# Altium schematic symbol library TitansLib.SchLib: 462 symbols (part 12 of 24)
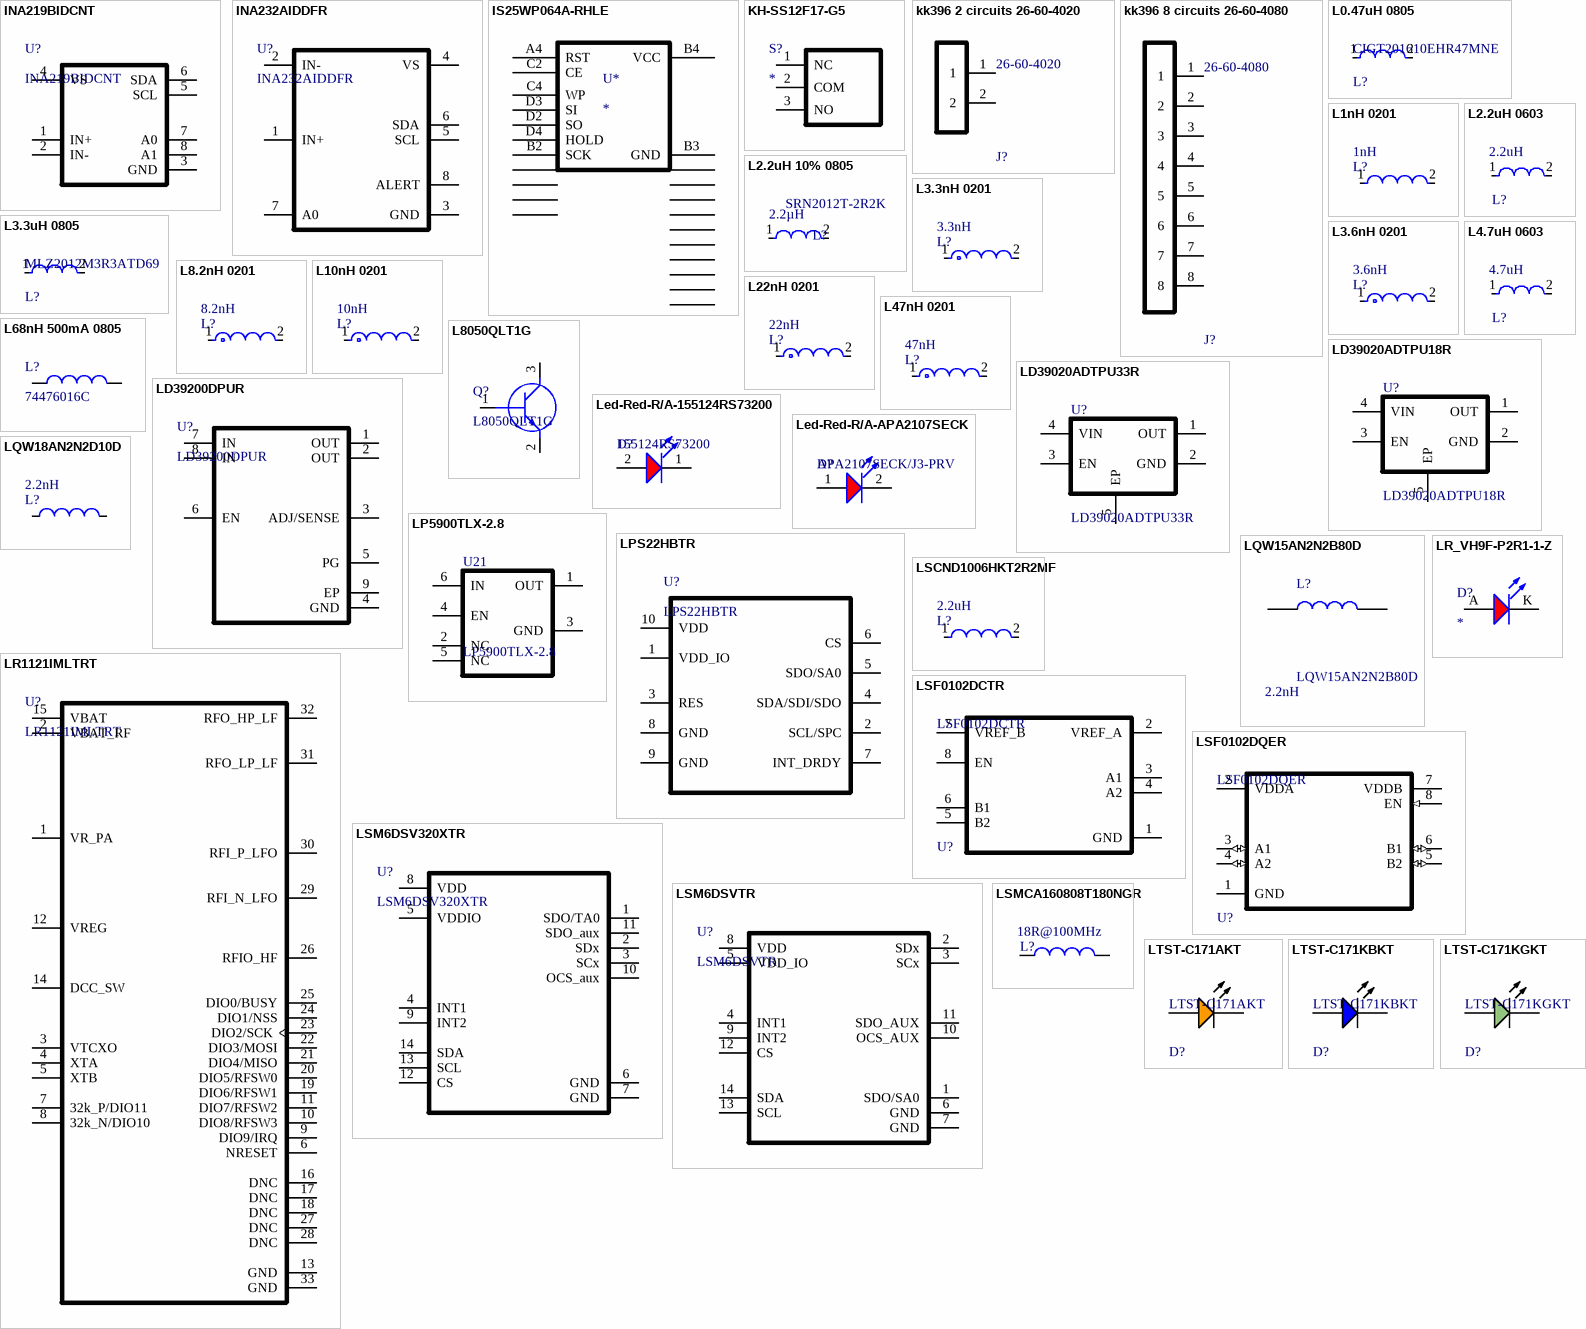
[diagram p28: symbols INA219BIDCNT to LTST-C171KGKT]

## LSF0102DQER
designator U?
Interface Circuit, PDSO8; Manufacturer: Texas Instruments; Max Supply Voltage: 5V; Number of Bits: 2; Channel Type: Bidirectional; Min Supply Voltage: 0uV; Propagation Delay: 1.3ns; Data Rate: 200Mbps; Low Level Output Current: 64mA; Logic Function: Translator; Turn-On Delay Time: 1.5ns; Number of Circuits: 1; Package Body Material: Plastic; Supply Voltage1-Max: 5.5V; Supply Voltage1-Min: 1.8V; Supply Voltage1-Nom: 3.3V; Radiation Hardening: No; Lead Free: Lead Free; Max Operating Temperature: 125°C; Mount: Surface Mount; Package Quantity: 5000; High Level Output Current: 64mA; RoHS Compliant: Yes; Packaging: Tape and Reel; Number of Pins: 8; Min Operating Temperature: -40°C; Supplier: Mouser; Supplier Part Number: 595-LSF0102DQER; Manufacturer Part Number: LSF0102DQER; RoHS: Yes; Category: Voltage Level Shifters; Stock: 65300; Pricing: 1=0.5, 10=0.352, 50=0.314, 100=0.273, 1000=0.231, 10000=0.202 (USD); Case/Package: VSON; Pins: 8; Package Shape: Rectangular; Terminal Finish: Nickel; JESD-609 Code: e4; Interface IC Type: INTERFACE CIRCUIT; JESD-30 Code: R-PDSO-N8; Moisture Sensitivity Level: 1; Channels: 1; Package Style: SMALL OUTLINE, VERY THIN PROFILEMeter; Peak Reflow Temperature (Cel): 260°C; Nominal Supply Voltage: 3.3V; Surface Mount: Yes; Terminal Form: No Lead; Terminal Position: DUAL; Length: 1.4mm; Width: 1mm; Height - Seated (Max): 0.4mm; Terminal Pitch: 0.35mm; Temperature Grade: AUTOMOTIVE; Reach SVHC Compliant: Yes; ComponentLink1URL: https://www.ti.com:443/lit/ds/symlink/lsf0101.pdf?src-supplier=IHS+Markit; ComponentLink1Description: https://www.ti.com:443/lit/ds/symlink/lsf0101.pdf?src-supplier=IHS+Markit; ComponentLink2URL: http://www.ti.com/lit/ds/symlink/lsf0102.pdf?src-supplier=Digikey; ComponentLink2Description: http://www.ti.com/lit/ds/symlink/lsf0102.pdf?src-supplier=Digikey; ComponentLink3URL: http://www.ti.com/lit/ds/symlink/lsf0102.pdf?src-supplier=Avnet; ComponentLink3Description: http://www.ti.com/lit/ds/symlink/lsf0102.pdf?src-supplier=Avnet; ComponentLink4URL: http://www.ti.com/lit/ds/symlink/lsf0102.pdf?src-supplier=Mouser; ComponentLink4Description: http://www.ti.com/lit/ds/symlink/lsf0102.pdf?src-supplier=Mouser; ComponentLink5URL: http://www.ti.com/lit/ds/symlink/lsf0102.pdf?src-supplier=Arrow+Electronics; ComponentLink5Description: http://www.ti.com/lit/ds/symlink/lsf0102.pdf?src-supplier=Arrow+Electronics; ComponentLink6URL: http://www.ti.com/lit/ds/symlink/lsf0102.pdf?src-supplier=Verical; ComponentLink6Description: http://www.ti.com/lit/ds/symlink/lsf0102.pdf?src-supplier=Verical; ComponentLink7URL: http://www.ti.com/lit/ds/symlink/lsf0102.pdf?src-supplier=Rochester+Electronics; ComponentLink7Description: http://www.ti.com/lit/ds/symlink/lsf0102.pdf?src-supplier=Rochester+Electronics
footprint DQE0008A-MFG
pins: 1 GND (power), 2 VDDA (power), 3 A1 (io), 4 A2 (io), 5 B2 (io), 6 B1 (io), 7 VDDB (power), 8 EN (in)

## LSM6DSV320XTR
designator U?
LSM6 Series 6-Axis ±320 g ±4000 dps 0.67 mA SPI/I²C IMU Sensor - LGA-14; Manufacturer: STMicroelectronics; Supplier: DigiKey; Supplier Part Number: 497-LSM6DSV320XTRDKR-ND; Manufacturer Part Number: LSM6DSV320XTR; RoHS: Compliant; Category: Sensors; Pricing: 1=6.74, 5=6.074, 10=5.826, 25=5.5296, 50=5.327, 100=5.1414, 500=4.9266 (USD); China RoHS: Non-Compliant; Lifecycle Status: Production; REACH SVHC: Yes; Supplier 1: Mouser; Supplier Part Number 1: 511-LSM6DSV320XTR; Supplier 2: DigiKey; Supplier Part Number 2: 497-LSM6DSV320XTRCT-ND; Supplier 3: DigiKey; Supplier Part Number 3: 497-LSM6DSV320XTR-ND
footprint LSM6DSV320XTR
pins: 1 SDO/TA0, 2 SDx, 3 SCx, 4 INT1, 5 VDDIO, 6 GND, 7 GND, 8 VDD, 9 INT2, 10 OCS_aux, 11 SDO_aux, 12 CS, 13 SCL, 14 SDA

## LSM6DSVTR
designator U?
3D Accelerometer And 3D Gyroscope; Manufacturer: STMicroelectronics; Supplier: Mouser; Supplier Part Number: 511-LSM6DSVTR; Manufacturer Part Number: LSM6DSVTR; RoHS: No; Category: Uncategorized; Stock: 5819; Pricing: 1=3.74, 10=3.21, 50=2.91, 100=2.8, 1000=2.51, 10000=2.34 (USD); Supplier 1: Digikey; Supplier Part Number 1: 497-LSM6DSVTRCT-ND; Supplier 2: Mouser; Supplier Part Number 2: 511-LSM6DSVTR
footprint LGA14-L_2P59X3P1X0P5_STM-L
pins: 1 SDO/SA0, 2 SDx, 3 SCx, 4 INT1, 5 VDD_IO, 6 GND, 7 GND, 8 VDD, 9 INT2, 10 OCS_AUX, 11 SDO_AUX, 12 CS, 13 SCL, 14 SDA

## LSMCA160808T180NGR
designator L?  Impedance: 18R@100MHz  (hidden comment: LSMCA160808T180NGR)
Ferrite Bead 18Ohm 7.5A 4Milliohms Wirewound 2-Pin 0603 Paper T/R; Manufacturer: TAIYO YUDEN; DC Resistance (DCR): 4mΩ; Number of Circuits: 1; ComponentLink1URL: http://tunmcdsvn.tun.st.com/Component_Documentation_Library/Trunk/Inductor/TAIYO_YUDEN_LSMC_Series; Supplier: DigiKey; Supplier Part Number: 587-LSMCA160808T180NGRCT-ND; Manufacturer Part Number: LSMCA160808T180NGR; RoHS: Compliant; Category: Ferrite Beads and Chips; Stock: 9000; Pricing: 1=0.11, 10=0.077, 25=0.0672, 50=0.0602, 100=0.0539, 250=0.0464, 500=0.04122, 1000=0.03642 (USD); Current Rating: 7.5A; Height: 800µm; Length: 1.6mm; Lifecycle Status: Production; Max Operating Temperature: 125°C; Min Operating Temperature: -40°C; Number of Terminals: 2; REACH SVHC: Yes; Width: 800µm; ComponentLink2URL: https://datasheet.octopart.com:443/LSMCA160808T180NGR-Taiyo-Yuden-datasheet-181264466.pdf?src-supplier=IHS; ComponentLink2Description: https://datasheet.octopart.com:443/LSMCA160808T180NGR-Taiyo-Yuden-datasheet-181264466.pdf?src-supplier=IHS; ComponentLink3URL: https://datasheet.octopart.com:443/LSMCA160808T180NGR-Taiyo-Yuden-datasheet-166554002.pdf?src-supplier=Future+Electronics; ComponentLink3Description: https://datasheet.octopart.com:443/LSMCA160808T180NGR-Taiyo-Yuden-datasheet-166554002.pdf?src-supplier=Future+Electronics; ComponentLink4URL: https://datasheet.octopart.com:443/LSMCA160808T180NGR-Taiyo-Yuden-datasheet-99833420.pdf?src-supplier=Future+Electronics; ComponentLink4Description: https://datasheet.octopart.com:443/LSMCA160808T180NGR-Taiyo-Yuden-datasheet-99833420.pdf?src-supplier=Future+Electronics
footprint IND_0603_LSMCA_H1P0
pins: 1, 2

## LTST-C171AKT
designator D?
LED ORANGE 0805 wavelength 602nm light intensity 35mcd Front Mounting; Manufacturer: Lite-On; Forward Current: 30mA; Forward Voltage: 2V; Lens Color: Clear, Colorless; Lens Style: Clear; Number of Circuits: 1; Power Dissipation: 75mW; Reverse Voltage: 5V; Shape: Rectangular; Test Current: 20mA; Viewing Angle: 130°; Wavelength: 570nm; Supplier: DigiKey; Supplier Part Number: 160-1419-1-ND; Manufacturer Part Number: LTST-C171AKT; RoHS: Compliant; Category: LEDs; Stock: 263738; Pricing: 1=0.11, 10=0.077, 100=0.0529, 500=0.04166, 1000=0.03789 (USD); Case/Package: 0805; Case Code (Imperial): 0805; Case Code (Metric): 2012; China RoHS: Compliant; Color: ORANGE; Depth: 1.25mm; Dominant Wavelength: 602nm; Height: 800µm; Illumination Color: ORANGE; Lead Free: Lead Free; Length: 2mm; Lens Transparency: Clear; Lifecycle Status: Production; Luminous Intensity: 35mcd; Max Operating Temperature: 85°C; Min Operating Temperature: -55°C; Mounting Technology: Surface Mount; Number of Elements: 1; Number of LEDs: 1; Pins: 2; Number of Terminals: 2; Peak Wavelength: 602nm; Power Rating: 75mW; Radiation Hardening: No; REACH SVHC: Yes; Schedule B: 8541402000, 8541402000|8541402000|8541402000|8541402000|8541402000; Terminal Pitch: 2.5mm; Width: 1.25mm; ComponentLink1URL: https://datasheet.octopart.com:443/LTST-C171KGKT-Lite-On-datasheet-62340967.pdf?src-supplier=ODG+(Origin+Data+Global); ComponentLink1Description: https://datasheet.octopart.com:443/LTST-C171KGKT-Lite-On-datasheet-62340967.pdf?src-supplier=ODG+(Origin+Data+Global); ComponentLink2URL: https://datasheet.octopart.com:443/LTST-C171KGKT-Lite-On-datasheet-180605161.pdf?src-supplier=IHS; ComponentLink2Description: https://datasheet.octopart.com:443/LTST-C171KGKT-Lite-On-datasheet-180605161.pdf?src-supplier=IHS; ComponentLink3URL: https://datasheet.octopart.com:443/LTST-C171KGKT-Lite-On-datasheet-159335.pdf?src-supplier=_legacy+Avnet; ComponentLink3Description: https://datasheet.octopart.com:443/LTST-C171KGKT-Lite-On-datasheet-159335.pdf?src-supplier=_legacy+Avnet; ComponentLink4URL: https://datasheet.octopart.com:443/LTST-C171KGKT-Lite-On-datasheet-166322636.pdf?src-supplier=TME; ComponentLink4Description: https://datasheet.octopart.com:443/LTST-C171KGKT-Lite-On-datasheet-166322636.pdf?src-supplier=TME; ComponentLink5URL: https://datasheet.octopart.com:443/LTST-C171KGKT-Lite-On-datasheet-165573808.pdf?src-supplier=TME; ComponentLink5Description: https://datasheet.octopart.com:443/LTST-C171KGKT-Lite-On-datasheet-165573808.pdf?src-supplier=TME; ComponentLink6URL: https://datasheet.octopart.com:443/LTST-C171KGKT-Lite-On-datasheet-137080783.pdf?src-supplier=X-ON; ComponentLink6Description: https://datasheet.octopart.com:443/LTST-C171KGKT-Lite-On-datasheet-137080783.pdf?src-supplier=X-ON; ComponentLink7URL: https://datasheet.octopart.com:443/LTST-C171KGKT-Lite-On-datasheet-8328465.pdf?src-supplier=Future+Electronics; ComponentLink7Description: https://datasheet.octopart.com:443/LTST-C171KGKT-Lite-On-datasheet-8328465.pdf?src-supplier=Future+Electronics; ComponentLink8URL: https://datasheet.octopart.com:443/LTST-C171KGKT-Lite-On-datasheet-19967.pdf?src-supplier=DigiKey; ComponentLink8Description: https://datasheet.octopart.com:443/LTST-C171KGKT-Lite-On-datasheet-19967.pdf?src-supplier=DigiKey; ComponentLink9URL: https://datasheet.octopart.com:443/LTST-C171KGKT-Lite-On-datasheet-14175002.pdf?src-supplier=iiiC; ComponentLink9Description: https://datasheet.octopart.com:443/LTST-C171KGKT-Lite-On-datasheet-14175002.pdf?src-supplier=iiiC; Supplier 1: DigiKey; Supplier Part Number 1: 160-1426-1-ND; Supplier 2: DigiKey; Supplier Part Number 2: 160-1426-2-ND; Supplier 3: Mouser; Supplier Part Number 3: 859-LTST-C171KGKT
footprint LTST-C171KXKT
pins: 1 A, 2 K

## LTST-C171KBKT
designator D?
LED BLUE 0805 wavelength 470nm light intensity 35mcd Front Mounting; Manufacturer: Lite-On; Color: RED; Dominant Wavelength: 468nm; Forward Current: 30mA; Forward Voltage: 2V; Lens Color: Clear, Colorless; Lens Style: Clear; Number of Circuits: 1; Power Dissipation: 75mW; Reverse Voltage: 5V; Shape: Rectangular; Test Current: 20mA; Viewing Angle: 130°; Wavelength: 570nm; Supplier: DigiKey; Supplier Part Number: 160-1645-1-ND; Manufacturer Part Number: LTST-C171KBKT; RoHS: Compliant; Category: LEDs; Stock: 263738; Pricing: 1=0.11, 10=0.077, 100=0.0529, 500=0.04166, 1000=0.03789 (USD); Case/Package: 0805; Case Code (Imperial): 0805; Case Code (Metric): 2012; China RoHS: Compliant; Depth: 1.25mm; Height: 800µm; Illumination Color: BLUE; Lead Free: Lead Free; Length: 2mm; Lens Transparency: Clear; Lifecycle Status: Production; Luminous Intensity: 35mcd; Max Operating Temperature: 85°C; Min Operating Temperature: -55°C; Mounting Technology: Surface Mount; Number of Elements: 1; Number of LEDs: 1; Pins: 2; Number of Terminals: 2; Peak Wavelength: 468nm; Power Rating: 75mW; Radiation Hardening: No; REACH SVHC: Yes; Schedule B: 8541402000, 8541402000|8541402000|8541402000|8541402000|8541402000; Terminal Pitch: 2.5mm; Width: 1.25mm; ComponentLink1URL: https://datasheet.octopart.com:443/LTST-C171KGKT-Lite-On-datasheet-62340967.pdf?src-supplier=ODG+(Origin+Data+Global); ComponentLink1Description: https://datasheet.octopart.com:443/LTST-C171KGKT-Lite-On-datasheet-62340967.pdf?src-supplier=ODG+(Origin+Data+Global); ComponentLink2URL: https://datasheet.octopart.com:443/LTST-C171KGKT-Lite-On-datasheet-180605161.pdf?src-supplier=IHS; ComponentLink2Description: https://datasheet.octopart.com:443/LTST-C171KGKT-Lite-On-datasheet-180605161.pdf?src-supplier=IHS; ComponentLink3URL: https://datasheet.octopart.com:443/LTST-C171KGKT-Lite-On-datasheet-159335.pdf?src-supplier=_legacy+Avnet; ComponentLink3Description: https://datasheet.octopart.com:443/LTST-C171KGKT-Lite-On-datasheet-159335.pdf?src-supplier=_legacy+Avnet; ComponentLink4URL: https://datasheet.octopart.com:443/LTST-C171KGKT-Lite-On-datasheet-166322636.pdf?src-supplier=TME; ComponentLink4Description: https://datasheet.octopart.com:443/LTST-C171KGKT-Lite-On-datasheet-166322636.pdf?src-supplier=TME; ComponentLink5URL: https://datasheet.octopart.com:443/LTST-C171KGKT-Lite-On-datasheet-165573808.pdf?src-supplier=TME; ComponentLink5Description: https://datasheet.octopart.com:443/LTST-C171KGKT-Lite-On-datasheet-165573808.pdf?src-supplier=TME; ComponentLink6URL: https://datasheet.octopart.com:443/LTST-C171KGKT-Lite-On-datasheet-137080783.pdf?src-supplier=X-ON; ComponentLink6Description: https://datasheet.octopart.com:443/LTST-C171KGKT-Lite-On-datasheet-137080783.pdf?src-supplier=X-ON; ComponentLink7URL: https://datasheet.octopart.com:443/LTST-C171KGKT-Lite-On-datasheet-8328465.pdf?src-supplier=Future+Electronics; ComponentLink7Description: https://datasheet.octopart.com:443/LTST-C171KGKT-Lite-On-datasheet-8328465.pdf?src-supplier=Future+Electronics; ComponentLink8URL: https://datasheet.octopart.com:443/LTST-C171KGKT-Lite-On-datasheet-19967.pdf?src-supplier=DigiKey; ComponentLink8Description: https://datasheet.octopart.com:443/LTST-C171KGKT-Lite-On-datasheet-19967.pdf?src-supplier=DigiKey; ComponentLink9URL: https://datasheet.octopart.com:443/LTST-C171KGKT-Lite-On-datasheet-14175002.pdf?src-supplier=iiiC; ComponentLink9Description: https://datasheet.octopart.com:443/LTST-C171KGKT-Lite-On-datasheet-14175002.pdf?src-supplier=iiiC; Supplier 1: DigiKey; Supplier Part Number 1: 160-1426-1-ND; Supplier 2: DigiKey; Supplier Part Number 2: 160-1426-2-ND; Supplier 3: Mouser; Supplier Part Number 3: 859-LTST-C171KGKT
footprint LTST-C171KXKT
pins: 1 A, 2 K

## LTST-C171KGKT
designator D?
LED yellow green 0805 wavelength 571nm light intensity 35mcd Front Mounting; Manufacturer: Lite-On; Forward Current: 30mA; Forward Voltage: 2V; Lens Color: Clear, Colorless; Lens Style: Clear; Number of Circuits: 1; Peak Wavelength: 574nm; Power Dissipation: 75mW; Reverse Voltage: 5V; Shape: Rectangular; Test Current: 20mA; Viewing Angle: 130°; Wavelength: 570nm; Supplier: DigiKey; Supplier Part Number: 160-1426-1-ND; Manufacturer Part Number: LTST-C171KGKT; RoHS: Compliant; Category: LEDs; Stock: 263738; Pricing: 1=0.11, 10=0.077, 100=0.0529, 500=0.04166, 1000=0.03789 (USD); Case/Package: 0805; Case Code (Imperial): 0805; Case Code (Metric): 2012; China RoHS: Compliant; Color: Green; Depth: 1.25mm; Dominant Wavelength: 571nm; Height: 800µm; Illumination Color: Green; Lead Free: Lead Free; Length: 2mm; Lens Transparency: Clear; Lifecycle Status: Production; Luminous Intensity: 35mcd; Max Operating Temperature: 85°C; Min Operating Temperature: -55°C; Mounting Technology: Surface Mount; Number of Elements: 1; Number of LEDs: 1; Pins: 2; Number of Terminals: 2; Power Rating: 75mW; Radiation Hardening: No; REACH SVHC: Yes; Schedule B: 8541402000, 8541402000|8541402000|8541402000|8541402000|8541402000; Terminal Pitch: 2.5mm; Width: 1.25mm; ComponentLink1URL: https://datasheet.octopart.com:443/LTST-C171KGKT-Lite-On-datasheet-62340967.pdf?src-supplier=ODG+(Origin+Data+Global); ComponentLink1Description: https://datasheet.octopart.com:443/LTST-C171KGKT-Lite-On-datasheet-62340967.pdf?src-supplier=ODG+(Origin+Data+Global); ComponentLink2URL: https://datasheet.octopart.com:443/LTST-C171KGKT-Lite-On-datasheet-180605161.pdf?src-supplier=IHS; ComponentLink2Description: https://datasheet.octopart.com:443/LTST-C171KGKT-Lite-On-datasheet-180605161.pdf?src-supplier=IHS; ComponentLink3URL: https://datasheet.octopart.com:443/LTST-C171KGKT-Lite-On-datasheet-159335.pdf?src-supplier=_legacy+Avnet; ComponentLink3Description: https://datasheet.octopart.com:443/LTST-C171KGKT-Lite-On-datasheet-159335.pdf?src-supplier=_legacy+Avnet; ComponentLink4URL: https://datasheet.octopart.com:443/LTST-C171KGKT-Lite-On-datasheet-166322636.pdf?src-supplier=TME; ComponentLink4Description: https://datasheet.octopart.com:443/LTST-C171KGKT-Lite-On-datasheet-166322636.pdf?src-supplier=TME; ComponentLink5URL: https://datasheet.octopart.com:443/LTST-C171KGKT-Lite-On-datasheet-165573808.pdf?src-supplier=TME; ComponentLink5Description: https://datasheet.octopart.com:443/LTST-C171KGKT-Lite-On-datasheet-165573808.pdf?src-supplier=TME; ComponentLink6URL: https://datasheet.octopart.com:443/LTST-C171KGKT-Lite-On-datasheet-137080783.pdf?src-supplier=X-ON; ComponentLink6Description: https://datasheet.octopart.com:443/LTST-C171KGKT-Lite-On-datasheet-137080783.pdf?src-supplier=X-ON; ComponentLink7URL: https://datasheet.octopart.com:443/LTST-C171KGKT-Lite-On-datasheet-8328465.pdf?src-supplier=Future+Electronics; ComponentLink7Description: https://datasheet.octopart.com:443/LTST-C171KGKT-Lite-On-datasheet-8328465.pdf?src-supplier=Future+Electronics; ComponentLink8URL: https://datasheet.octopart.com:443/LTST-C171KGKT-Lite-On-datasheet-19967.pdf?src-supplier=DigiKey; ComponentLink8Description: https://datasheet.octopart.com:443/LTST-C171KGKT-Lite-On-datasheet-19967.pdf?src-supplier=DigiKey; ComponentLink9URL: https://datasheet.octopart.com:443/LTST-C171KGKT-Lite-On-datasheet-14175002.pdf?src-supplier=iiiC; ComponentLink9Description: https://datasheet.octopart.com:443/LTST-C171KGKT-Lite-On-datasheet-14175002.pdf?src-supplier=iiiC; Supplier 1: DigiKey; Supplier Part Number 1: 160-1426-1-ND; Supplier 2: DigiKey; Supplier Part Number 2: 160-1426-2-ND; Supplier 3: Mouser; Supplier Part Number 3: 859-LTST-C171KGKT
footprint LTST-C171KGKT
pins: 1 A, 2 K

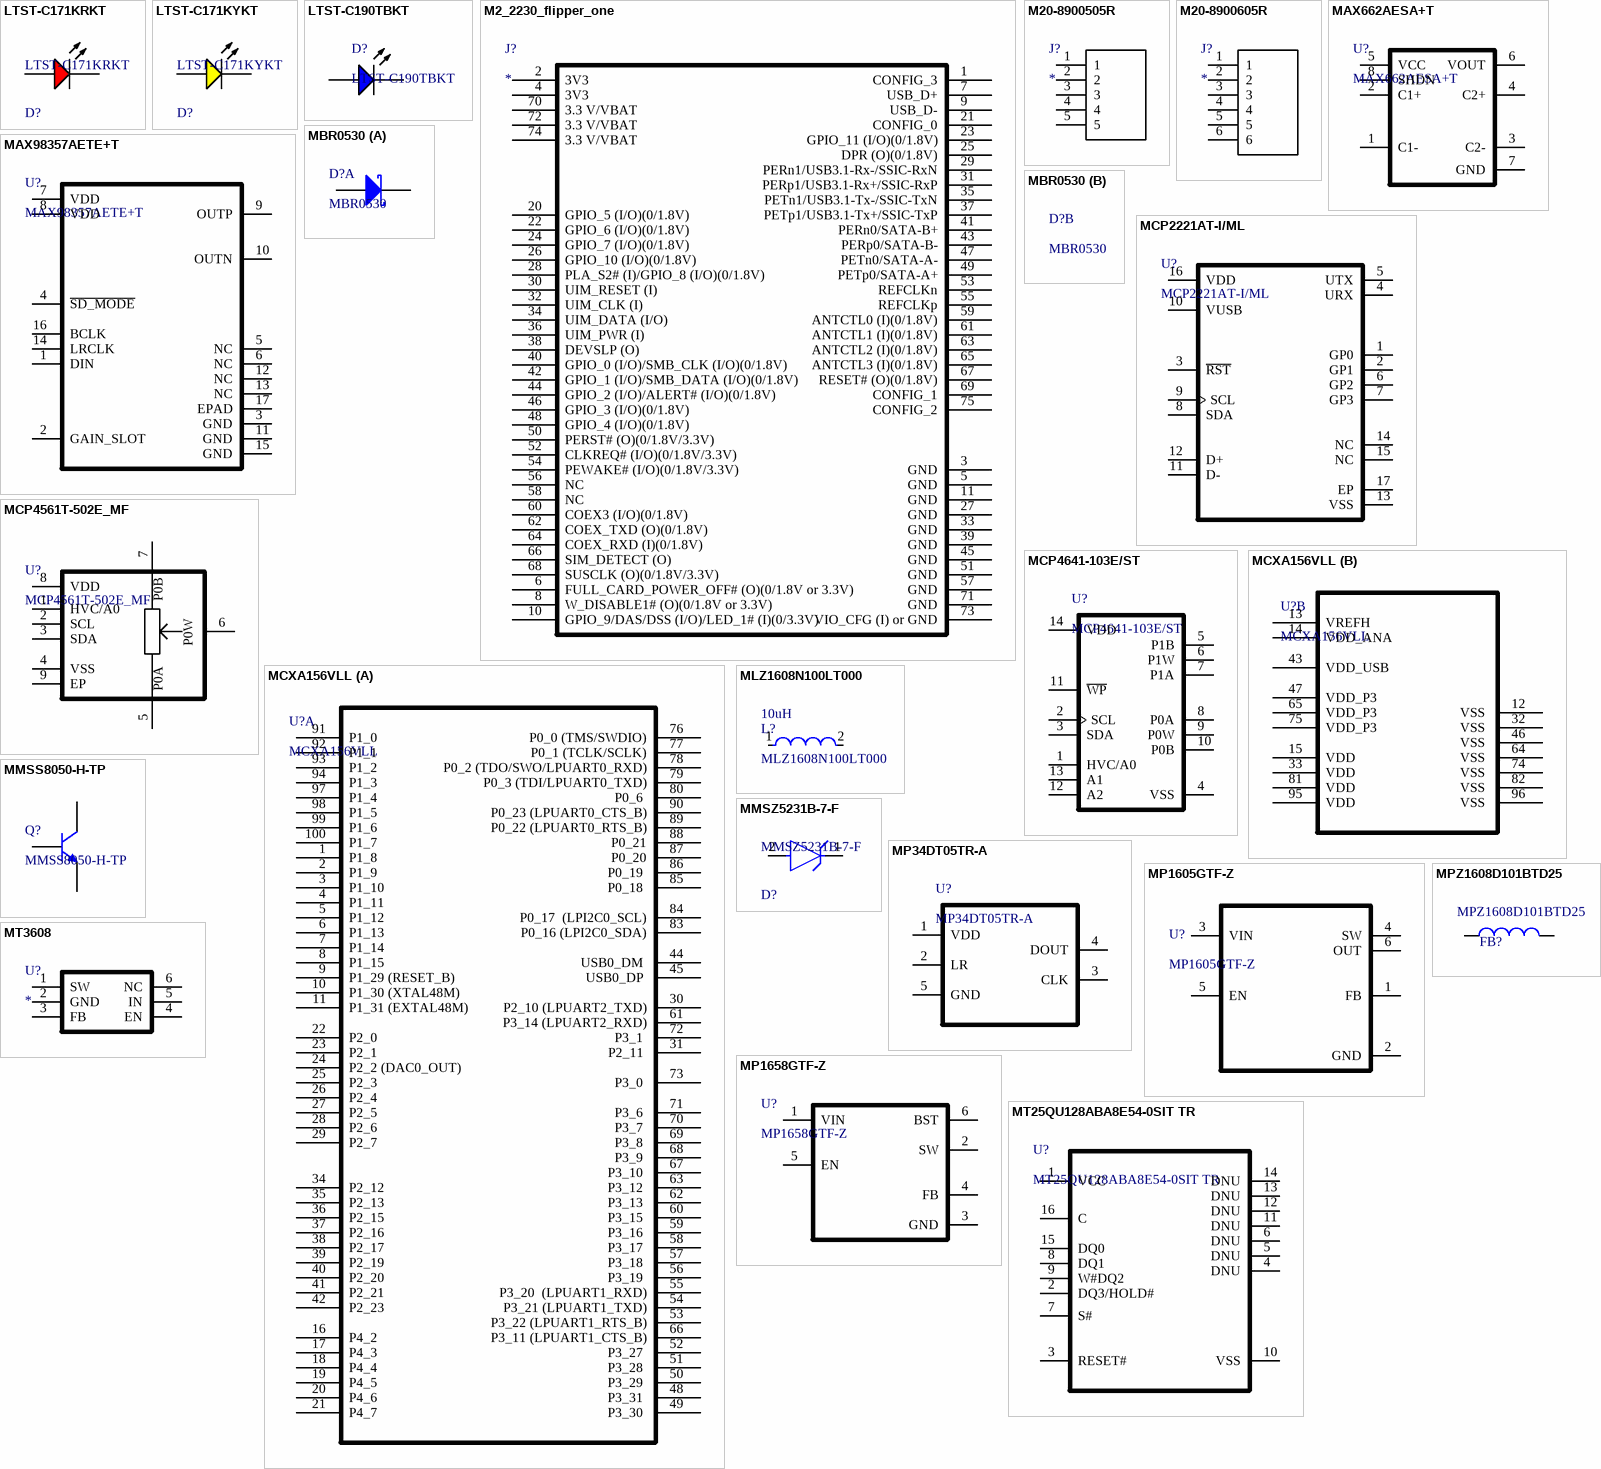
[diagram p7: symbols LTST-C171KRKT to MT3608]

## LTST-C171KRKT
designator D?
LED RED 0805 wavelength 639nm light intensity 35mcd Front Mounting; Manufacturer: Lite-On; Forward Current: 30mA; Forward Voltage: 2V; Lens Color: Clear, Colorless; Lens Style: Clear; Number of Circuits: 1; Power Dissipation: 75mW; Reverse Voltage: 5V; Shape: Rectangular; Test Current: 20mA; Viewing Angle: 130°; Wavelength: 570nm; Supplier: DigiKey; Supplier Part Number: 160-1427-1-ND; Manufacturer Part Number: LTST-C171KRKT; RoHS: Compliant; Category: LEDs; Stock: 263738; Pricing: 1=0.11, 10=0.077, 100=0.0529, 500=0.04166, 1000=0.03789 (USD); Case/Package: 0805; Case Code (Imperial): 0805; Case Code (Metric): 2012; China RoHS: Compliant; Color: RED; Depth: 1.25mm; Dominant Wavelength: 639nm; Height: 800µm; Illumination Color: RED; Lead Free: Lead Free; Length: 2mm; Lens Transparency: Clear; Lifecycle Status: Production; Luminous Intensity: 35mcd; Max Operating Temperature: 85°C; Min Operating Temperature: -55°C; Mounting Technology: Surface Mount; Number of Elements: 1; Number of LEDs: 1; Pins: 2; Number of Terminals: 2; Peak Wavelength: 639nm; Power Rating: 75mW; Radiation Hardening: No; REACH SVHC: Yes; Schedule B: 8541402000, 8541402000|8541402000|8541402000|8541402000|8541402000; Terminal Pitch: 2.5mm; Width: 1.25mm; ComponentLink1URL: https://datasheet.octopart.com:443/LTST-C171KGKT-Lite-On-datasheet-62340967.pdf?src-supplier=ODG+(Origin+Data+Global); ComponentLink1Description: https://datasheet.octopart.com:443/LTST-C171KGKT-Lite-On-datasheet-62340967.pdf?src-supplier=ODG+(Origin+Data+Global); ComponentLink2URL: https://datasheet.octopart.com:443/LTST-C171KGKT-Lite-On-datasheet-180605161.pdf?src-supplier=IHS; ComponentLink2Description: https://datasheet.octopart.com:443/LTST-C171KGKT-Lite-On-datasheet-180605161.pdf?src-supplier=IHS; ComponentLink3URL: https://datasheet.octopart.com:443/LTST-C171KGKT-Lite-On-datasheet-159335.pdf?src-supplier=_legacy+Avnet; ComponentLink3Description: https://datasheet.octopart.com:443/LTST-C171KGKT-Lite-On-datasheet-159335.pdf?src-supplier=_legacy+Avnet; ComponentLink4URL: https://datasheet.octopart.com:443/LTST-C171KGKT-Lite-On-datasheet-166322636.pdf?src-supplier=TME; ComponentLink4Description: https://datasheet.octopart.com:443/LTST-C171KGKT-Lite-On-datasheet-166322636.pdf?src-supplier=TME; ComponentLink5URL: https://datasheet.octopart.com:443/LTST-C171KGKT-Lite-On-datasheet-165573808.pdf?src-supplier=TME; ComponentLink5Description: https://datasheet.octopart.com:443/LTST-C171KGKT-Lite-On-datasheet-165573808.pdf?src-supplier=TME; ComponentLink6URL: https://datasheet.octopart.com:443/LTST-C171KGKT-Lite-On-datasheet-137080783.pdf?src-supplier=X-ON; ComponentLink6Description: https://datasheet.octopart.com:443/LTST-C171KGKT-Lite-On-datasheet-137080783.pdf?src-supplier=X-ON; ComponentLink7URL: https://datasheet.octopart.com:443/LTST-C171KGKT-Lite-On-datasheet-8328465.pdf?src-supplier=Future+Electronics; ComponentLink7Description: https://datasheet.octopart.com:443/LTST-C171KGKT-Lite-On-datasheet-8328465.pdf?src-supplier=Future+Electronics; ComponentLink8URL: https://datasheet.octopart.com:443/LTST-C171KGKT-Lite-On-datasheet-19967.pdf?src-supplier=DigiKey; ComponentLink8Description: https://datasheet.octopart.com:443/LTST-C171KGKT-Lite-On-datasheet-19967.pdf?src-supplier=DigiKey; ComponentLink9URL: https://datasheet.octopart.com:443/LTST-C171KGKT-Lite-On-datasheet-14175002.pdf?src-supplier=iiiC; ComponentLink9Description: https://datasheet.octopart.com:443/LTST-C171KGKT-Lite-On-datasheet-14175002.pdf?src-supplier=iiiC; Supplier 1: DigiKey; Supplier Part Number 1: 160-1426-1-ND; Supplier 2: DigiKey; Supplier Part Number 2: 160-1426-2-ND; Supplier 3: Mouser; Supplier Part Number 3: 859-LTST-C171KGKT
footprint LTST-C171KXKT
pins: 1 A, 2 K

## LTST-C171KYKT
designator D?
LED YELLOW 0805 wavelength 585nm light intensity 35mcd Front Mounting; Manufacturer: Lite-On; Forward Current: 30mA; Forward Voltage: 2V; Lens Color: Clear, Colorless; Lens Style: Clear; Number of Circuits: 1; Power Dissipation: 75mW; Reverse Voltage: 5V; Shape: Rectangular; Test Current: 20mA; Viewing Angle: 130°; Wavelength: 570nm; Supplier: DigiKey; Supplier Part Number: 160-1431-1-ND; Manufacturer Part Number: LTST-C171KYKT; RoHS: Compliant; Category: LEDs; Stock: 263738; Pricing: 1=0.11, 10=0.077, 100=0.0529, 500=0.04166, 1000=0.03789 (USD); Case/Package: 0805; Case Code (Imperial): 0805; Case Code (Metric): 2012; China RoHS: Compliant; Color: YELLOW; Depth: 1.25mm; Dominant Wavelength: 585nm; Height: 800µm; Illumination Color: YELLOW; Lead Free: Lead Free; Length: 2mm; Lens Transparency: Clear; Lifecycle Status: Production; Luminous Intensity: 35mcd; Max Operating Temperature: 85°C; Min Operating Temperature: -55°C; Mounting Technology: Surface Mount; Number of Elements: 1; Number of LEDs: 1; Pins: 2; Number of Terminals: 2; Peak Wavelength: 585nm; Power Rating: 75mW; Radiation Hardening: No; REACH SVHC: Yes; Schedule B: 8541402000, 8541402000|8541402000|8541402000|8541402000|8541402000; Terminal Pitch: 2.5mm; Width: 1.25mm; ComponentLink1URL: https://datasheet.octopart.com:443/LTST-C171KGKT-Lite-On-datasheet-62340967.pdf?src-supplier=ODG+(Origin+Data+Global); ComponentLink1Description: https://datasheet.octopart.com:443/LTST-C171KGKT-Lite-On-datasheet-62340967.pdf?src-supplier=ODG+(Origin+Data+Global); ComponentLink2URL: https://datasheet.octopart.com:443/LTST-C171KGKT-Lite-On-datasheet-180605161.pdf?src-supplier=IHS; ComponentLink2Description: https://datasheet.octopart.com:443/LTST-C171KGKT-Lite-On-datasheet-180605161.pdf?src-supplier=IHS; ComponentLink3URL: https://datasheet.octopart.com:443/LTST-C171KGKT-Lite-On-datasheet-159335.pdf?src-supplier=_legacy+Avnet; ComponentLink3Description: https://datasheet.octopart.com:443/LTST-C171KGKT-Lite-On-datasheet-159335.pdf?src-supplier=_legacy+Avnet; ComponentLink4URL: https://datasheet.octopart.com:443/LTST-C171KGKT-Lite-On-datasheet-166322636.pdf?src-supplier=TME; ComponentLink4Description: https://datasheet.octopart.com:443/LTST-C171KGKT-Lite-On-datasheet-166322636.pdf?src-supplier=TME; ComponentLink5URL: https://datasheet.octopart.com:443/LTST-C171KGKT-Lite-On-datasheet-165573808.pdf?src-supplier=TME; ComponentLink5Description: https://datasheet.octopart.com:443/LTST-C171KGKT-Lite-On-datasheet-165573808.pdf?src-supplier=TME; ComponentLink6URL: https://datasheet.octopart.com:443/LTST-C171KGKT-Lite-On-datasheet-137080783.pdf?src-supplier=X-ON; ComponentLink6Description: https://datasheet.octopart.com:443/LTST-C171KGKT-Lite-On-datasheet-137080783.pdf?src-supplier=X-ON; ComponentLink7URL: https://datasheet.octopart.com:443/LTST-C171KGKT-Lite-On-datasheet-8328465.pdf?src-supplier=Future+Electronics; ComponentLink7Description: https://datasheet.octopart.com:443/LTST-C171KGKT-Lite-On-datasheet-8328465.pdf?src-supplier=Future+Electronics; ComponentLink8URL: https://datasheet.octopart.com:443/LTST-C171KGKT-Lite-On-datasheet-19967.pdf?src-supplier=DigiKey; ComponentLink8Description: https://datasheet.octopart.com:443/LTST-C171KGKT-Lite-On-datasheet-19967.pdf?src-supplier=DigiKey; ComponentLink9URL: https://datasheet.octopart.com:443/LTST-C171KGKT-Lite-On-datasheet-14175002.pdf?src-supplier=iiiC; ComponentLink9Description: https://datasheet.octopart.com:443/LTST-C171KGKT-Lite-On-datasheet-14175002.pdf?src-supplier=iiiC; Supplier 1: DigiKey; Supplier Part Number 1: 160-1426-1-ND; Supplier 2: DigiKey; Supplier Part Number 2: 160-1426-2-ND; Supplier 3: Mouser; Supplier Part Number 3: 859-LTST-C171KGKT
footprint LTST-C171KXKT
pins: 1 A, 2 K

## LTST-C190TBKT
designator D?
LED blue 0603 wavelength 465~475nm light intensity 28~180mcd Front Mounting; Manufacturer: Lite-On; Current: 2A; Dominant Wavelength: 475nm; Forward Current: 20mA; Forward Voltage: 3.8V; Interface: Serial; Lens Color: Clear, Colorless; Lens Style: Clear; Luminous Intensity: 70mcd; Max Supply Voltage: 3.6V; Min Supply Voltage: 2.1V; Nominal Supply Voltage (DC): 3V; Number of Circuits: 1; Peak Wavelength: 468nm; Power Dissipation: 76mW; Reverse Voltage: 5V; Shape: Rectangular; Viewing Angle: 130°; Supplier: DigiKey; Supplier Part Number: 160-1646-1-ND; Manufacturer Part Number: LTST-C190TBKT; RoHS: Compliant; Category: LEDs; Stock: 286026; Pricing: 1=0.14, 10=0.094, 100=0.0645, 500=0.051, 1000=0.04651, 2000=0.04266 (USD); Case/Package: 0603; Case Code (Imperial): 0603; Case Code (Metric): 1608; China RoHS: Compliant; Color: Blue; Contact Plating: Tin; Country of Origin: Thailand; Depth: 800µm; Export Control Classification Number (ECCN) Code: EAR99; Height: 800µm; Harmonized Tariff Schedule (HTS) Code: 8541.40.20.00; Illumination Color: Blue; Introduction Date: 2001-01-31; Lead Free: Lead Free; Length: 3mm; Lens Transparency: Clear; Lifecycle Status: Production; Max Operating Temperature: 80°C; Min Operating Temperature: -20°C; Mounting Technology: Surface Mount; Number of Elements: 1; Number of LEDs: 1; Pins: 2; Number of Terminals: 2; Packaging: Cut Tape; Radiation Hardening: No; REACH SVHC: Yes; Schedule B: 8541402000, 8541402000|8541402000|8541402000|8541402000|8541402000; Terminal Pitch: 1.5mm; Test Current: 20mA; Wavelength: 475nm; Width: 3mm; ComponentLink1URL: https://datasheet.octopart.com:443/LTST-C190TBKT-Lite-On-datasheet-26684744.pdf?src-supplier=Upverter; ComponentLink1Description: https://datasheet.octopart.com:443/LTST-C190TBKT-Lite-On-datasheet-26684744.pdf?src-supplier=Upverter; ComponentLink2URL: https://datasheet.octopart.com:443/LTST-C190TBKT-Lite-On-datasheet-158557.pdf?src-supplier=Upverter; ComponentLink2Description: https://datasheet.octopart.com:443/LTST-C190TBKT-Lite-On-datasheet-158557.pdf?src-supplier=Upverter; ComponentLink3URL: https://datasheet.octopart.com:443/LTST-C190TBKT-Lite-On-datasheet-157246185.pdf?src-supplier=ODG+(Origin+Data+Global); ComponentLink3Description: https://datasheet.octopart.com:443/LTST-C190TBKT-Lite-On-datasheet-157246185.pdf?src-supplier=ODG+(Origin+Data+Global); ComponentLink4URL: https://datasheet.octopart.com:443/LTST-C190TBKT-Lite-On-datasheet-165573809.pdf?src-supplier=TME; ComponentLink4Description: https://datasheet.octopart.com:443/LTST-C190TBKT-Lite-On-datasheet-165573809.pdf?src-supplier=TME; ComponentLink5URL: https://datasheet.octopart.com:443/LTST-C190TBKT-Lite-On-datasheet-165573808.pdf?src-supplier=TME; ComponentLink5Description: https://datasheet.octopart.com:443/LTST-C190TBKT-Lite-On-datasheet-165573808.pdf?src-supplier=TME; ComponentLink6URL: https://datasheet.octopart.com:443/LTST-C190TBKT-Lite-On-datasheet-13699638.pdf?src-supplier=_legacy+Avnet; ComponentLink6Description: https://datasheet.octopart.com:443/LTST-C190TBKT-Lite-On-datasheet-13699638.pdf?src-supplier=_legacy+Avnet; ComponentLink7URL: https://datasheet.octopart.com:443/LTST-C190TBKT-Lite-On-datasheet-10435795.pdf?src-supplier=Jameco; ComponentLink7Description: https://datasheet.octopart.com:443/LTST-C190TBKT-Lite-On-datasheet-10435795.pdf?src-supplier=Jameco; ComponentLink8URL: https://datasheet.octopart.com:443/LTST-C190TBKT-Lite-On-datasheet-86356.pdf?src-supplier=DigiKey; ComponentLink8Description: https://datasheet.octopart.com:443/LTST-C190TBKT-Lite-On-datasheet-86356.pdf?src-supplier=DigiKey; ComponentLink9URL: https://datasheet.octopart.com:443/LTST-C190TBKT-Lite-On-datasheet-14175004.pdf?src-supplier=iiiC; ComponentLink9Description: https://datasheet.octopart.com:443/LTST-C190TBKT-Lite-On-datasheet-14175004.pdf?src-supplier=iiiC; ComponentLink10URL: https://datasheet.octopart.com:443/LTST-C190TBKT-Lite-On-datasheet-86397318.pdf?src-supplier=Future+Electronics; ComponentLink10Description: https://datasheet.octopart.com:443/LTST-C190TBKT-Lite-On-datasheet-86397318.pdf?src-supplier=Future+Electronics; Supplier 1: DigiKey; Supplier Part Number 1: 160-1646-6-ND; Supplier 2: DigiKey; Supplier Part Number 2: 160-1646-1-ND; Supplier 3: Mouser; Supplier Part Number 3: 859-LTST-C190TBKT
footprint LTST-C190TBKT (SMD, 2-Leads, Body 1.6x0.8mm)
pins: 1 A, 2 K

## M2_2230_flipper_one
designator J?
footprint M2-2230-Key-B (M.2 2230 type B Flipper_one pinnout)
pins: 1 CONFIG_3, 2 3V3, 3 GND, 4 3V3, 5 GND, 6 FULL_CARD_POWER_OFF# (O)(0/1.8V or 3.3V), 7 USB_D+, 8 W_DISABLE1# (O)(0/1.8V or 3.3V), 9 USB_D-, 10 GPIO_9/DAS/DSS (I/O)/LED_1# (I)(0/3.3V), 11 GND, 20 GPIO_5 (I/O)(0/1.8V), 21 CONFIG_0, 22 GPIO_6 (I/O)(0/1.8V), 23 GPIO_11 (I/O)(0/1.8V), 24 GPIO_7 (I/O)(0/1.8V), 25 DPR (O)(0/1.8V), 26 GPIO_10 (I/O)(0/1.8V), 27 GND, 28 PLA_S2# (I)/GPIO_8 (I/O)(0/1.8V), 29 PERn1/USB3.1-Rx-/SSIC-RxN, 30 UIM_RESET (I), 31 PERp1/USB3.1-Rx+/SSIC-RxP, 32 UIM_CLK (I), 33 GND, 34 UIM_DATA (I/O), 35 PETn1/USB3.1-Tx-/SSIC-TxN, 36 UIM_PWR (I), 37 PETp1/USB3.1-Tx+/SSIC-TxP, 38 DEVSLP (O), 39 GND, 40 GPIO_0 (I/O)/SMB_CLK (I/O)(0/1.8V), 41 PERn0/SATA-B+, 42 GPIO_1 (I/O)/SMB_DATA (I/O)(0/1.8V), 43 PERp0/SATA-B-, 44 GPIO_2 (I/O)/ALERT# (I/O)(0/1.8V), 45 GND, 46 GPIO_3 (I/O)(0/1.8V), 47 PETn0/SATA-A-, 48 GPIO_4 (I/O)(0/1.8V), 49 PETp0/SATA-A+, 50 PERST# (O)(0/1.8V/3.3V), 51 GND, 52 CLKREQ# (I/O)(0/1.8V/3.3V), 53 REFCLKn, 54 PEWAKE# (I/O)(0/1.8V/3.3V), 55 REFCLKp, 56 NC, 57 GND, 58 NC, 59 ANTCTL0 (I)(0/1.8V), 60 COEX3 (I/O)(0/1.8V), 61 ANTCTL1 (I)(0/1.8V), 62 COEX_TXD (O)(0/1.8V), 63 ANTCTL2 (I)(0/1.8V), 64 COEX_RXD (I)(0/1.8V), 65 ANTCTL3 (I)(0/1.8V), 66 SIM_DETECT (O), 67 RESET# (O)(0/1.8V), 68 SUSCLK (O)(0/1.8V/3.3V), 69 CONFIG_1, 70 3.3 V/VBAT, 71 GND, 72 3.3 V/VBAT, 73 VIO_CFG (I) or GND, 74 3.3 V/VBAT, 75 CONFIG_2

## M20-8900505R
designator J?
Connector; Manufacturer_Name: Harwin; Manufacturer_Part_Number: M20-8900505R; Datasheet Link: https://content.harwin.com/m/c71d01a6430751a0/original/DRG-00423-Technical-Drawing-Datasheet-M20-890R-pdf.pdf; Mouser Part Number: N/A; Mouser Price/Stock: https://www.mouser.co.uk/ProductDetail/Harwin/M20-8900505R?qs=0rbOLB9uh%252BBV0J8%252B05GUMA%3D%3D
footprint M20-8900505R
pins: 1, 2, 3, 4, 5

## M20-8900605R
designator J?
Connector; Manufacturer_Name: Harwin; Manufacturer_Part_Number: M20-8900605R; Datasheet Link: https://content.harwin.com/m/c71d01a6430751a0/original/DRG-00423-Technical-Drawing-Datasheet-M20-890R-pdf.pdf; Mouser Part Number: 855-M20-8900605R; Mouser Price/Stock: https://www.mouser.co.uk/ProductDetail/Harwin/M20-8900605R?qs=KpdAywxU013gD0k2TMQlBA%3D%3D
footprint M20-8900605R
pins: 1, 2, 3, 4, 5, 6

## MAX662AESA+T
designator U?
Boost converter 30mA 11.4V~12.6V SOIC-8 Voltage Regulators - DC DC Switching Regulators RoHS; Manufacturer 1: Analog Devices; Datasheet Link: http://datasheets.maximintegrated.com/en/ds/MAX662A.pdf; Height: 1.75mm; Manufacturer Part Number 1: MAX662AESA+T; Supplier Part Number 1: C2976348; Supplier Link 1: https://www.lcsc.com/product-detail/C2976348.html?s_z=n_MAX662A; Supplier 1: LCSC
footprint SOIC127P600X175-8N
pins: 1 C1-, 2 C1+, 3 C2-, 4 C2+, 5 VCC, 6 VOUT, 7 GND, 8 SHDN

## MAX98357AETE+T
designator U?
MAX98357A Series 5.5 V 3.2 W PCM Input Class D Audio Power Amplifier - TQFN-16; Manufacturer: Analog Devices; Manufacturer Lifecycle Status: PRODUCTION; Max Junction Temperature (Tj): 150°C; Max Output current: 1.6A; Max Output Power: 3.2W; Max Power Dissipation: 1.666W; Max Supply Voltage: 5.5V; Min Supply Voltage: 2.5V; Number of Channels: 1; Power Supply Rejection Ratio (PSRR): 77dB; Voltage Gain: 15dB; Supplier: LCSC; Supplier Part Number: C910544; Manufacturer Part Number: MAX98357AETE+T; RoHS: Compliant; Category: Amplifiers - Audio; Stock: 13498; Pricing: 1=9.5506, 1=1.1367, 1=10.4259, 1=1.3065, 10=8.3539, 10=0.9943, 10=9.1196, 10=1.1428, 30=7.2252, 30=0.86, 30=7.8875, 30=0.9884, 100=6.3897, 100=0.7605, 100=6.9754, 100=0.8741, 500=6.0403, 500=0.7189, 500=6.5939, 500=0.8263, 1000=5.8707, 1000=0.6987, 1000=6.4088, 1000=0.8031 (CNY); Contact Plating: Tin; Height: 800µm; Lifecycle Status: Production; Max Operating Temperature: 85°C; Min Operating Temperature: -40°C; Mounting Technology: Surface Mount; Pins: 16; Output Power: 3.2W; Packaging: Tape & Reel; Radiation Hardening: No; Schedule B: 8542330000|8542330000|8542330000|8542330000|8542330000|8542330000|8542330000|8542330000|8542330000|8542330000|8542330000|8542330000|8542330000|8542330000|8542330000|8542330000|8542330000|8542330000|8542330000|8542330000|8542330000|8542330000|8542330000|85; ComponentLink1URL: https://octopart.com:443/opatz8j6/c1?t=IhJPLnCvAGkqtQSlrYZiUKDfABTPU6QdkeGyw1tX6K5Gl6OURue6GI275KF-FG51CgMiiXrxyG0pvFDov7CWgIkrMFyr1mtUW0E6dykdyuX4uP9i-aAh7yup3PdJ_zVstV5EVAoZSyyFHVWNE7FImDj9bv-lsrbs5XZbRiR9Hbwj7YE9cMwsV0mSwtfjd3tY5KQPswjQh9vq_jlDxk7_z_XBXPLLyYly57CMGIhZBWDP5RZBYuqfJ7oguxmgaSk-pATR_3oJahIFTaQ-bQF9clYtUtU8O6h6G4Ijow48lK40zMyuv_OFi8Wk8ZY&src-supplier=Analog+Devices; ComponentLink1Description: https://octopart.com:443/opatz8j6/c1?t=IhJPLnCvAGkqtQSlrYZiUKDfABTPU6QdkeGyw1tX6K5Gl6OURue6GI275KF-FG51CgMiiXrxyG0pvFDov7CWgIkrMFyr1mtUW0E6dykdyuX4uP9i-aAh7yup3PdJ_zVstV5EVAoZSyyFHVWNE7FImDj9bv-lsrbs5XZbRiR9Hbwj7YE9cMwsV0mSwtfjd3tY5KQPswjQh9vq_jlDxk7_z_XBXPLLyYly57CMGIhZBWDP5RZBYuqfJ7oguxmgaSk-pATR_3oJahIFTaQ-bQF9clYtUtU8O6h6G4Ijow48lK40zMyuv_OFi8Wk8ZY&src-supplier=Analog+Devices; ComponentLink2URL: https://datasheet.octopart.com:443/MAX98357AETE%2BT-Analog-Devices-datasheet-140103828.pdf?src-supplier=Upverter; ComponentLink2Description: https://datasheet.octopart.com:443/MAX98357AETE%2BT-Analog-Devices-datasheet-140103828.pdf?src-supplier=Upverter; ComponentLink3URL: https://datasheet.octopart.com:443/MAX98357AETE%2BT-Maxim-Integrated-datasheet-82537686.pdf?src-supplier=Upverter; ComponentLink3Description: https://datasheet.octopart.com:443/MAX98357AETE%2BT-Maxim-Integrated-datasheet-82537686.pdf?src-supplier=Upverter; ComponentLink4URL: https://sigma.octopart.com:443/141243535/technical_drawing/Maxim-Integrated-MAX98357AETE%2BT.pdf?src-supplier=Upverter; ComponentLink4Description: https://sigma.octopart.com:443/141243535/technical_drawing/Maxim-Integrated-MAX98357AETE%2BT.pdf?src-supplier=Upverter; ComponentLink5URL: https://datasheet.octopart.com:443/MAX98357AETE%2BT-Maxim-Integrated-datasheet-134531866.pdf?src-supplier=Augswan; ComponentLink5Description: https://datasheet.octopart.com:443/MAX98357AETE%2BT-Maxim-Integrated-datasheet-134531866.pdf?src-supplier=Augswan; ComponentLink6URL: https://sigma.octopart.com:443/140082349/technical_drawing/Maxim-Integrated-MAX98357AETE%2BT.pdf?src-supplier=ShanghaiCT; ComponentLink6Description: https://sigma.octopart.com:443/140082349/technical_drawing/Maxim-Integrated-MAX98357AETE%2BT.pdf?src-supplier=ShanghaiCT; ComponentLink7URL: https://datasheet.octopart.com/MAX98357AETE%2BT-Maxim-Integrated-datasheet-38886134.pdf; ComponentLink7Description: https://datasheet.octopart.com/MAX98357AETE%2BT-Maxim-Integrated-datasheet-38886134.pdf; ComponentLink8URL: https://datasheet.octopart.com:443/MAX98357AETE%2BT-Maxim-Integrated-datasheet-8516998.pdf?src-supplier=Future+Electronics; ComponentLink8Description: https://datasheet.octopart.com:443/MAX98357AETE%2BT-Maxim-Integrated-datasheet-8516998.pdf?src-supplier=Future+Electronics; ComponentLink9URL: http://sigma.octopart.com:80/conflict_mineral_statement/Analog-Devices-company-33.pdf?src-supplier=Compliance+Statements; ComponentLink9Description: http://sigma.octopart.com:80/conflict_mineral_statement/Analog-Devices-company-33.pdf?src-supplier=Compliance+Statements; ComponentLink10URL: http://sigma.octopart.com:80/conflict_mineral_statement/Maxim-Integrated-company-65.pdf?src-supplier=Compliance+Statements; ComponentLink10Description: http://sigma.octopart.com:80/conflict_mineral_statement/Maxim-Integrated-company-65.pdf?src-supplier=Compliance+Statements; ComponentLink11URL: http://sigma.octopart.com:80/rohs_statement/Maxim-Integrated-company-66.pdf?src-supplier=Compliance+Statements; ComponentLink11Description: http://sigma.octopart.com:80/rohs_statement/Maxim-Integrated-company-66.pdf?src-supplier=Compliance+Statements; ComponentLink12URL: http://sigma.octopart.com:80/reach_statement/Maxim-Integrated-company-67.pdf?src-supplier=Compliance+Statements; ComponentLink12Description: http://sigma.octopart.com:80/reach_statement/Maxim-Integrated-company-67.pdf?src-supplier=Compliance+Statements; ComponentLink13URL: https://octopart.com:443/opatz8j6/c1?t=EbuMCqNOOFrGgZttBO8ki57liWFM2Pc3Em4nrhivGXoxGNKmwB8NXkhQ1-4SyWTGZRhhxfkVNBtktozA-CFrv2DI2n2X6nj4jVsAlFmQIHHZ_zOP6SS4jhsHt1RyehOh5YUhzJDj4CuBNHlpEpe2GcSMSlSLTMQJmL6fpgM4VzBwMAa_Djxq_WkoTsyAjC4S-5C8wDNLOhoWK8UmOqud0VJwumH9vvQd2EP4fc6Gwb7pkSJc3kws9qT0ObZsIaYHZQbJp9sxWXAyEYR_gG2EetdpJX9eZ8E8StyfneUXIz1RoKpi5V6krFTdan8&src-supplier=Compliance+Statements; ComponentLink13Description: https://octopart.com:443/opatz8j6/c1?t=EbuMCqNOOFrGgZttBO8ki57liWFM2Pc3Em4nrhivGXoxGNKmwB8NXkhQ1-4SyWTGZRhhxfkVNBtktozA-CFrv2DI2n2X6nj4jVsAlFmQIHHZ_zOP6SS4jhsHt1RyehOh5YUhzJDj4CuBNHlpEpe2GcSMSlSLTMQJmL6fpgM4VzBwMAa_Djxq_WkoTsyAjC4S-5C8wDNLOhoWK8UmOqud0VJwumH9vvQd2EP4fc6Gwb7pkSJc3kws9qT0ObZsIaYHZQbJp9sxWXAyEYR_gG2EetdpJX9eZ8E8StyfneUXIz1RoKpi5V6krFTdan8&src-supplier=Compliance+Statements
footprint QFN50P300X300X75_HS-17N (QFN, 16-Leads, Body 3.00x3.00mm, Pitch 0.50mm, Thermal Pad 1.10x1.10mm, IPC Medium Density)
pins: 1 DIN, 2 GAIN_SLOT, 3 GND, 4 ~{SD_MODE}, 5 NC, 6 NC, 7 VDD, 8 VDD, 9 OUTP, 10 OUTN, 11 GND, 12 NC, 13 NC, 14 LRCLK, 15 GND, 16 BCLK, 17 EPAD

## MBR0530
designator D?
Rectifier Diode, Schottky, 1 Phase, 1 Element, 0.5A, 30V V(RRM), Silicon; Manufacturer: onsemi; Manufacturer Part Number: MBR0530T3G; Package Body Material: Plastic; Number of Elements: 1; Max Output current: 500mA; Time @ Peak Reflow Temperature-Max (s): 40s; Forward Voltage: 375mV; Non-rep Pk Forward Current-Max: 5.5A; Additional Feature: FREE WHEELING DIODE; Qualification Status: Not Qualified; Supplier: Mouser; Supplier Part Number: 863-MBR0530T3G; RoHS: Yes; Category: Schottky Diodes; Stock: 125683; Pricing: 1=0.19, 10=0.08, 50=0.08, 100=0.061, 1000=0.051, 10000=0.037 (USD); Pins: 2; Diode Element Material: SILICON; Package Shape: Rectangular; Terminal Finish: Tin; Min Operating Temperature: -65°C; Max Operating Temperature: 125°C; Diode Type: RECTIFIER; JESD-609 Code: e3; JESD-30 Code: R-PDSO-G2; Package Style: SMALL OUTLINEMeter; Peak Reflow Temperature (Cel): 260°C; Rep Pk Reverse Voltage-Max: 30V; Surface Mount: Yes; Technology: SCHOTTKY; Terminal Form: Gull Wing; Terminal Position: DUAL; Moisture Sensitivity Level: 1; RoHS Compliant: Yes; Reach SVHC Compliant: Yes; ComponentLink1URL: https://datasheet.ciiva.com:443/pdfs/VipMasterIC/IC/ONSM/ONSM-S-A0000134658/ONSM-S-A0000134658-1.pdf?src-supplier=IHS+Markit; ComponentLink1Description: https://datasheet.ciiva.com:443/pdfs/VipMasterIC/IC/ONSM/ONSM-S-A0000134658/ONSM-S-A0000134658-1.pdf?src-supplier=IHS+Markit; ComponentLink2URL: https://datasheet.ciiva.com/6381/mbr0530t1-d-6381904.pdf?src-supplier=Digikey; ComponentLink2Description: https://datasheet.ciiva.com/6381/mbr0530t1-d-6381904.pdf?src-supplier=Digikey; ComponentLink3URL: https://datasheet.ciiva.com/7962/85890-7962703.pdf?src-supplier=Element14; ComponentLink3Description: https://datasheet.ciiva.com/7962/85890-7962703.pdf?src-supplier=Element14; ComponentLink4URL: https://datasheet.ciiva.com/8294/mbr0530t1-d-8294572.pdf?src-supplier=Avnet; ComponentLink4Description: https://datasheet.ciiva.com/8294/mbr0530t1-d-8294572.pdf?src-supplier=Avnet; ComponentLink5URL: https://datasheet.ciiva.com/15144/getdatasheetpartid-86762-15144599.pdf?src-supplier=Verical; ComponentLink5Description: https://datasheet.ciiva.com/15144/getdatasheetpartid-86762-15144599.pdf?src-supplier=Verical; ComponentLink6URL: https://datasheet.ciiva.com/6381/mbr0530t1-d-6381902.pdf?src-supplier=Digikey; ComponentLink6Description: https://datasheet.ciiva.com/6381/mbr0530t1-d-6381902.pdf?src-supplier=Digikey; Supplier 1: Mouser; Supplier Part Number 1: 863-MBR0530T1G; Supplier 2: Digikey; Supplier Part Number 2: MBR0530T1GOSCT-ND
part A pins: 1 A, 2 K

## MCP2221AT-I/ML
designator U?
IC Usb to I2C/UART 16QFN "usb Bridge, Usb to I2C/UART Usb 2.0 I2C, Uart Interface 16-QFN (4X4)"; Manufacturer: Microchip; Data Rate: 12Mbps; Interface: I2C, UART, USB; Max Junction Temperature (Tj): 150°C; Max Supply Voltage: 5.5V; Min Supply Voltage: 3V; Number of Ports: 1; Operating Supply Current: 13mA; USB Standard: USB 2.0; Supplier: DigiKey; Supplier Part Number: 150-MCP2221AT-I/MLCT-ND; Manufacturer Part Number: MCP2221AT-I/ML; RoHS: Compliant; Category: UART Interface ICs; Stock: 7702; Pricing: 1=2.8, 25=2.33, 100=2.13 (USD); Projected EOL Date: 2044-04-05; Case/Package: VQFN; Country of Assembly: Thailand; Country of Fabrication: United States of America; Country of Origin: Thailand; Export Control Classification Number (ECCN) Code: EAR99; Height: 1mm; Harmonized Tariff Schedule (HTS) Code: 8542.39.0060; Introduction Date: 2016-04-05; Lifecycle Status: Production; Max Operating Temperature: 85°C; Min Operating Temperature: -40°C; Pins: 16; ComponentLink1URL: https://datasheet.octopart.com:443/MCP2221AT-I-ML-Microchip-datasheet-147335752.pdf?src-supplier=Augswan; ComponentLink1Description: https://datasheet.octopart.com:443/MCP2221AT-I-ML-Microchip-datasheet-147335752.pdf?src-supplier=Augswan; ComponentLink2URL: https://datasheet.octopart.com:443/MCP2221AT-I-ML-Microchip-datasheet-159754599.pdf?src-supplier=Microchip; ComponentLink2Description: https://datasheet.octopart.com:443/MCP2221AT-I-ML-Microchip-datasheet-159754599.pdf?src-supplier=Microchip; ComponentLink3URL: https://datasheet.octopart.com:443/MCP2221AT-I-ML-Microchip-datasheet-100062994.pdf?src-supplier=SHENGYU+ELECTRONICS; ComponentLink3Description: https://datasheet.octopart.com:443/MCP2221AT-I-ML-Microchip-datasheet-100062994.pdf?src-supplier=SHENGYU+ELECTRONICS; ComponentLink4URL: http://sigma.octopart.com:80/188451865/materials_sheet/Microchip-MCP2221AT-I-ML.pdf?src-supplier=Compliance+Statements; ComponentLink4Description: http://sigma.octopart.com:80/188451865/materials_sheet/Microchip-MCP2221AT-I-ML.pdf?src-supplier=Compliance+Statements; ComponentLink5URL: http://sigma.octopart.com:80/188846623/materials_sheet/Microchip-MCP2221AT-I-ML.pdf?src-supplier=Compliance+Statements; ComponentLink5Description: http://sigma.octopart.com:80/188846623/materials_sheet/Microchip-MCP2221AT-I-ML.pdf?src-supplier=Compliance+Statements; ComponentLink6URL: http://sigma.octopart.com:80/rohs_statement/Microchip-company-71.pdf?src-supplier=Compliance+Statements; ComponentLink6Description: http://sigma.octopart.com:80/rohs_statement/Microchip-company-71.pdf?src-supplier=Compliance+Statements; ComponentLink7URL: http://sigma.octopart.com:80/reach_statement/Microchip-company-70.pdf?src-supplier=Compliance+Statements; ComponentLink7Description: http://sigma.octopart.com:80/reach_statement/Microchip-company-70.pdf?src-supplier=Compliance+Statements; ComponentLink8URL: http://sigma.octopart.com:80/conflict_mineral_statement/Microchip-company-69.pdf?src-supplier=Compliance+Statements; ComponentLink8Description: http://sigma.octopart.com:80/conflict_mineral_statement/Microchip-company-69.pdf?src-supplier=Compliance+Statements; ComponentLink9URL: http://sigma.octopart.com:80/conflict_mineral_statement/Microchip-company-68.pdf?src-supplier=Compliance+Statements; ComponentLink9Description: http://sigma.octopart.com:80/conflict_mineral_statement/Microchip-company-68.pdf?src-supplier=Compliance+Statements; Supplier 1: DigiKey; Supplier Part Number 1: 150-MCP2221AT-I/MLCT-ND; Supplier 2: DigiKey; Supplier Part Number 2: 150-MCP2221AT-I/MLTR-ND; Supplier 3: Mouser; Supplier Part Number 3: 579-MCP2221AT-I/ML
footprint QFN65P400X400X100_HS-17N (QFN, 16-Leads, Body 4.00x4.00mm, Pitch 0.65mm, Thermal Pad 2.65x2.65mm, IPC Medium Density)
pins: 1 GP0, 2 GP1, 3 ~{RST}, 4 URX, 5 UTX, 6 GP2, 7 GP3, 8 SDA, 9 SCL, 10 VUSB, 11 D-, 12 D+, 13 VSS, 14 NC, 15 NC, 16 VDD, 17 EP

## MCP4561T-502E_MF
designator U?
Digital Potentiometer 50k Ohm 1 Circuit 257 Taps I2C Interface 8-MSOP; Manufacturer 1: Microchip; Manufacturer Part Number 1: MCP4561T-502E/MF; Datasheet Link: http://ww1.microchip.com/downloads/en/DeviceDoc/22107B.pdf; Height: 1mm; Supplier Part Number 1: 579-MCP4561T-502E/MF; Supplier Link 1: https://www.mouser.co.uk/ProductDetail/Microchip-Technology/MCP4561T-502E-MF?qs=hH%252BOa0VZEiBQM1MBzaVhaQ%3D%3D; Supplier Unit Price 1: 0.81; Supplier 1: DigiKey
footprint SON65P300X300X100-9N-D
pins: 1 HVC/A0, 2 SCL, 3 SDA, 4 VSS, 5 P0A, 6 P0W, 7 P0B, 8 VDD, 9 EP

## MCP4641-103E/ST
designator U?
Digital Potentiometer, 2 Func, 10000ohm, Increment/decrement Control Interface, 129 Positions, CMOS, PDSO14; Manufacturer: Microchip; Package Body Material: Plastic; Bandwidth-Nom: 1kHz; Channels: 2; Number of Positions: 129; Package Equivalence Code: TSSOP14,.25; Power Supplies: 3/5V; Resistance Law: Linear; Resistor Terminal Voltage-Max: 5.5V; Resistor Terminal Voltage-Min: 0V; Nominal Supply Voltage: 2.7V; Temperature Coefficient-Nom: 150ppm/°C; Time @ Peak Reflow Temperature-Max (s): 40s; Total Resistance-Nom: 10kR; Qualification Status: Not Qualified; ComponentLink2URL: http://ww1.microchip.com/downloads/en/DeviceDoc/22107a.pdf; ComponentLink1URL: http://www.microchip.com/; ComponentLink3URL: http://www.microchip.com/stellent/groups/techpub_sg/documents/packagingspec/en012702.pdf; PackageReference: TSSOP-ST14; ComponentLink3Description: Package Specification; PackageDescription: 14-Lead Plastic Thin Shrink Small Outline (ST) - 4.4mm Body [TSSOP]; DatasheetVersion: revA, Nov-2008; ComponentLink2Description: Datasheet; ComponentLink1Description: Manufacturer URL; PackageVersion: revBB, Aug-2009; RevisionNote: URLs added.; Supplier: Newark; Supplier Part Number: 49P5395; Manufacturer Part Number: MCP4641-103E/ST; RoHS: Yes; Category: Digital Potentiometers; Stock: 1132; Pricing: 1=1.4, 10=1.28, 25=1.16, 50=1.11, 192=1.06 (USD); Case/Package: TSSOP; Pins: 14; Package Shape: Rectangular; Terminal Finish: Tin; Min Operating Temperature: -40°C; Max Operating Temperature: 125°C; JESD-609 Code: e3; Control Interface: INCREMENT/DECREMENT; Converter Type: DIGITAL POTENTIOMETER; JESD-30 Code: R-PDSO-G14; Moisture Sensitivity Level: 1; Package Style: SMALL OUTLINE, THIN PROFILE, SHRINK PITCHMeter; Peak Reflow Temperature (Cel): 260°C; Surface Mount: Yes; Technology: CMOS; Terminal Form: Gull Wing; Terminal Position: DUAL; Length: 5mm; Width: 4.4mm; Height - Seated (Max): 1.2mm; Terminal Pitch: 0.65mm; Temperature Grade: AUTOMOTIVE; Reach SVHC Compliant: Yes; RoHS Compliant: Yes; ComponentLink4URL: https://datasheet.ciiva.com:443/pdfs/VipMasterIC/IC/MCHP/MCHPS04299/MCHPS04299-1.pdf?src-supplier=IHS+Markit; ComponentLink4Description: https://datasheet.ciiva.com:443/pdfs/VipMasterIC/IC/MCHP/MCHPS04299/MCHPS04299-1.pdf?src-supplier=IHS+Markit; ComponentLink5URL: https://datasheet.ciiva.com/41459/001083246-da-01-en-ic-dgtl-pot-mcp4641-103e-st-tssop-14-mcp-41459003.pdf?src-supplier=Conrad; ComponentLink5Description: https://datasheet.ciiva.com/41459/001083246-da-01-en-ic-dgtl-pot-mcp4641-103e-st-tssop-14-mcp-41459003.pdf?src-supplier=Conrad; ComponentLink6URL: https://datasheet.ciiva.com/1330/22107a-1330296.pdf?src-supplier=Digikey; ComponentLink6Description: https://datasheet.ciiva.com/1330/22107a-1330296.pdf?src-supplier=Digikey; ComponentLink7URL: https://datasheet.ciiva.com/3045/jp544078-3045885.pdf?src-supplier=Avnet; ComponentLink7Description: https://datasheet.ciiva.com/3045/jp544078-3045885.pdf?src-supplier=Avnet; ComponentLink8URL: https://datasheet.ciiva.com/1144/1789212-1144769.pdf?src-supplier=Element14; ComponentLink8Description: https://datasheet.ciiva.com/1144/1789212-1144769.pdf?src-supplier=Element14; Supplier 1: Digikey; Supplier Part Number 1: MCP4641-103E/ST-ND; Supplier 2: Mouser; Supplier Part Number 2: 579-MCP4641-103E/ST
footprint TSSOP-ST14 (TSOP, 14-Leads, Body 5x4.4mm, Pitch 0.65mm, IPC High Density)
pins: 1 HVC/A0, 2 SCL, 3 SDA, 4 VSS, 5 P1B, 6 P1W, 7 P1A, 8 P0A, 9 P0W, 10 P0B, 11 ~{WP}, 12 A2, 13 A1, 14 VDD